# Altium schematic symbol library 调理电路板.SCHLIB: 432 symbols (part 4 of 8)
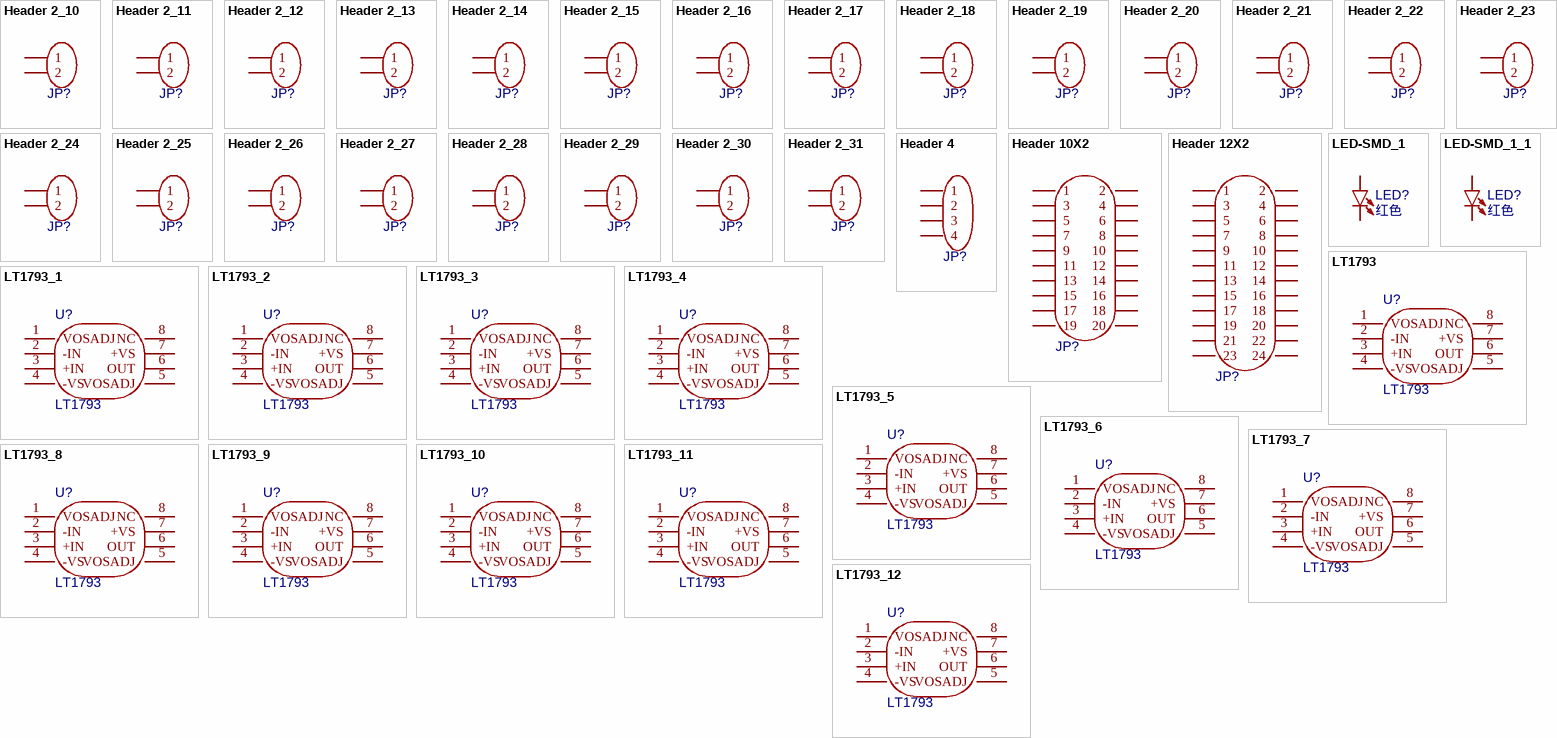
[diagram p13: symbols Header 2_10 to LT1793_12]

## Header 2_14
designator JP?, comment HDR-1X2  (value not drawn)
2P接插件; Device: Header 2; 版权归属: 封装库来自淘宝 ID：黄晶宝石; Origin Footprint: XH2.54-WI-2P; OriginFootprint 2: XH2.54-LI-2P; OriginFootprint 3: HDR2.54-M-LI-2P; OriginFootprint 4: HDR2.54-WI-2P; OriginFootprint 5: HDR2.54-WS-2P; OriginFootprint 6: HDR2.54-Y-LI-2P; OriginFootprint 7: HDR2.54-M-WS-2P; OriginFootprint 8: KF2510-LI-2P; OriginFootprint 9: XH2.54-WS-2P; OriginFootprint 10: XH2.54-LS-2P; OriginFootprint 11: KF2EDGK-2.54-LI-2P; OriginFootprint 12: KF2EDGK-2.54-WI-2P; UniqueId: 57b57ccbe062354d; AddInBom: yes; OriginModelName: HDR2.54-1P; BOM名称: 2P接插件; 联系售后: https://shop463601444.taobao.com; DesignItemID: Header 2; LibraryName: 5.4 - 接插件-脚距2.54 (100mil); SymbolName: Header 2; FootprintName: HDR2.54-LI-2P
footprint HDR2.54-LI-2P
pins: 1, 2

## Header 2_15
designator JP?, comment HDR-1X2  (value not drawn)
2P接插件; Device: Header 2; 版权归属: 封装库来自淘宝 ID：黄晶宝石; Origin Footprint: XH2.54-WI-2P; OriginFootprint 2: XH2.54-LI-2P; OriginFootprint 3: HDR2.54-M-LI-2P; OriginFootprint 4: HDR2.54-WI-2P; OriginFootprint 5: HDR2.54-WS-2P; OriginFootprint 6: HDR2.54-Y-LI-2P; OriginFootprint 7: HDR2.54-M-WS-2P; OriginFootprint 8: KF2510-LI-2P; OriginFootprint 9: XH2.54-WS-2P; OriginFootprint 10: XH2.54-LS-2P; OriginFootprint 11: KF2EDGK-2.54-LI-2P; OriginFootprint 12: KF2EDGK-2.54-WI-2P; UniqueId: 6655918135225170; AddInBom: yes; OriginModelName: HDR2.54-1P; BOM名称: 2P接插件; 联系售后: https://shop463601444.taobao.com; DesignItemID: Header 2; LibraryName: 5.4 - 接插件-脚距2.54 (100mil); SymbolName: Header 2; FootprintName: HDR2.54-LI-2P
footprint HDR2.54-LI-2P
pins: 1, 2

## Header 2_16
designator JP?, comment HDR-1X2  (value not drawn)
2P接插件; Device: Header 2; 版权归属: 封装库来自淘宝 ID：黄晶宝石; Origin Footprint: XH2.54-WI-2P; OriginFootprint 2: XH2.54-LI-2P; OriginFootprint 3: HDR2.54-M-LI-2P; OriginFootprint 4: HDR2.54-WI-2P; OriginFootprint 5: HDR2.54-WS-2P; OriginFootprint 6: HDR2.54-Y-LI-2P; OriginFootprint 7: HDR2.54-M-WS-2P; OriginFootprint 8: KF2510-LI-2P; OriginFootprint 9: XH2.54-WS-2P; OriginFootprint 10: XH2.54-LS-2P; OriginFootprint 11: KF2EDGK-2.54-LI-2P; OriginFootprint 12: KF2EDGK-2.54-WI-2P; UniqueId: 02277a1cd8d596a2; AddInBom: yes; OriginModelName: HDR2.54-1P; BOM名称: 2P接插件; 联系售后: https://shop463601444.taobao.com; DesignItemID: Header 2; LibraryName: 5.4 - 接插件-脚距2.54 (100mil); SymbolName: Header 2; FootprintName: HDR2.54-LI-2P
footprint HDR2.54-LI-2P
pins: 1, 2

## Header 2_17
designator JP?, comment HDR-1X2  (value not drawn)
2P接插件; Device: Header 2; 版权归属: 封装库来自淘宝 ID：黄晶宝石; Origin Footprint: XH2.54-WI-2P; OriginFootprint 2: XH2.54-LI-2P; OriginFootprint 3: HDR2.54-M-LI-2P; OriginFootprint 4: HDR2.54-WI-2P; OriginFootprint 5: HDR2.54-WS-2P; OriginFootprint 6: HDR2.54-Y-LI-2P; OriginFootprint 7: HDR2.54-M-WS-2P; OriginFootprint 8: KF2510-LI-2P; OriginFootprint 9: XH2.54-WS-2P; OriginFootprint 10: XH2.54-LS-2P; OriginFootprint 11: KF2EDGK-2.54-LI-2P; OriginFootprint 12: KF2EDGK-2.54-WI-2P; UniqueId: dacbd2010d520776; AddInBom: yes; OriginModelName: HDR2.54-1P; BOM名称: 2P接插件; 联系售后: https://shop463601444.taobao.com; DesignItemID: Header 2; LibraryName: 5.4 - 接插件-脚距2.54 (100mil); SymbolName: Header 2; FootprintName: HDR2.54-LI-2P
footprint HDR2.54-LI-2P
pins: 1, 2

## Header 2_18
designator JP?, comment HDR-1X2  (value not drawn)
2P接插件; Device: Header 2; 版权归属: 封装库来自淘宝 ID：黄晶宝石; Origin Footprint: XH2.54-WI-2P; OriginFootprint 2: XH2.54-LI-2P; OriginFootprint 3: HDR2.54-M-LI-2P; OriginFootprint 4: HDR2.54-WI-2P; OriginFootprint 5: HDR2.54-WS-2P; OriginFootprint 6: HDR2.54-Y-LI-2P; OriginFootprint 7: HDR2.54-M-WS-2P; OriginFootprint 8: KF2510-LI-2P; OriginFootprint 9: XH2.54-WS-2P; OriginFootprint 10: XH2.54-LS-2P; OriginFootprint 11: KF2EDGK-2.54-LI-2P; OriginFootprint 12: KF2EDGK-2.54-WI-2P; UniqueId: ddeec7be49001c93; AddInBom: yes; OriginModelName: HDR2.54-1P; BOM名称: 2P接插件; 联系售后: https://shop463601444.taobao.com; DesignItemID: Header 2; LibraryName: 5.4 - 接插件-脚距2.54 (100mil); SymbolName: Header 2; FootprintName: HDR2.54-LI-2P
footprint HDR2.54-LI-2P
pins: 1, 2

## Header 2_19
designator JP?, comment HDR-1X2  (value not drawn)
2P接插件; Device: Header 2; 版权归属: 封装库来自淘宝 ID：黄晶宝石; Origin Footprint: XH2.54-WI-2P; OriginFootprint 2: XH2.54-LI-2P; OriginFootprint 3: HDR2.54-M-LI-2P; OriginFootprint 4: HDR2.54-WI-2P; OriginFootprint 5: HDR2.54-WS-2P; OriginFootprint 6: HDR2.54-Y-LI-2P; OriginFootprint 7: HDR2.54-M-WS-2P; OriginFootprint 8: KF2510-LI-2P; OriginFootprint 9: XH2.54-WS-2P; OriginFootprint 10: XH2.54-LS-2P; OriginFootprint 11: KF2EDGK-2.54-LI-2P; OriginFootprint 12: KF2EDGK-2.54-WI-2P; UniqueId: 62dfc6d8d4781687; AddInBom: yes; OriginModelName: HDR2.54-1P; BOM名称: 2P接插件; 联系售后: https://shop463601444.taobao.com; DesignItemID: Header 2; LibraryName: 5.4 - 接插件-脚距2.54 (100mil); SymbolName: Header 2; FootprintName: HDR2.54-LI-2P
footprint HDR2.54-LI-2P
pins: 1, 2

## Header 2_20
designator JP?, comment HDR-1X2  (value not drawn)
2P接插件; Device: Header 2; 版权归属: 封装库来自淘宝 ID：黄晶宝石; Origin Footprint: XH2.54-WI-2P; OriginFootprint 2: XH2.54-LI-2P; OriginFootprint 3: HDR2.54-M-LI-2P; OriginFootprint 4: HDR2.54-WI-2P; OriginFootprint 5: HDR2.54-WS-2P; OriginFootprint 6: HDR2.54-Y-LI-2P; OriginFootprint 7: HDR2.54-M-WS-2P; OriginFootprint 8: KF2510-LI-2P; OriginFootprint 9: XH2.54-WS-2P; OriginFootprint 10: XH2.54-LS-2P; OriginFootprint 11: KF2EDGK-2.54-LI-2P; OriginFootprint 12: KF2EDGK-2.54-WI-2P; UniqueId: ac1a4a7fdd8dee85; AddInBom: yes; OriginModelName: HDR2.54-1P; BOM名称: 2P接插件; 联系售后: https://shop463601444.taobao.com; DesignItemID: Header 2; LibraryName: 5.4 - 接插件-脚距2.54 (100mil); SymbolName: Header 2; FootprintName: HDR2.54-LI-2P
footprint HDR2.54-LI-2P
pins: 1, 2

## Header 2_21
designator JP?, comment HDR-1X2  (value not drawn)
2P接插件; Device: Header 2; 版权归属: 封装库来自淘宝 ID：黄晶宝石; Origin Footprint: XH2.54-WI-2P; OriginFootprint 2: XH2.54-LI-2P; OriginFootprint 3: HDR2.54-M-LI-2P; OriginFootprint 4: HDR2.54-WI-2P; OriginFootprint 5: HDR2.54-WS-2P; OriginFootprint 6: HDR2.54-Y-LI-2P; OriginFootprint 7: HDR2.54-M-WS-2P; OriginFootprint 8: KF2510-LI-2P; OriginFootprint 9: XH2.54-WS-2P; OriginFootprint 10: XH2.54-LS-2P; OriginFootprint 11: KF2EDGK-2.54-LI-2P; OriginFootprint 12: KF2EDGK-2.54-WI-2P; UniqueId: c40e93d5b111b9de; AddInBom: yes; OriginModelName: HDR2.54-1P; BOM名称: 2P接插件; 联系售后: https://shop463601444.taobao.com; DesignItemID: Header 2; LibraryName: 5.4 - 接插件-脚距2.54 (100mil); SymbolName: Header 2; FootprintName: HDR2.54-LI-2P
footprint HDR2.54-LI-2P
pins: 1, 2

## Header 2_22
designator JP?, comment HDR-1X2  (value not drawn)
2P接插件; Device: Header 2; 版权归属: 封装库来自淘宝 ID：黄晶宝石; Origin Footprint: XH2.54-WI-2P; OriginFootprint 2: XH2.54-LI-2P; OriginFootprint 3: HDR2.54-M-LI-2P; OriginFootprint 4: HDR2.54-WI-2P; OriginFootprint 5: HDR2.54-WS-2P; OriginFootprint 6: HDR2.54-Y-LI-2P; OriginFootprint 7: HDR2.54-M-WS-2P; OriginFootprint 8: KF2510-LI-2P; OriginFootprint 9: XH2.54-WS-2P; OriginFootprint 10: XH2.54-LS-2P; OriginFootprint 11: KF2EDGK-2.54-LI-2P; OriginFootprint 12: KF2EDGK-2.54-WI-2P; UniqueId: 85e96206a86bca40; AddInBom: yes; OriginModelName: HDR2.54-1P; BOM名称: 2P接插件; 联系售后: https://shop463601444.taobao.com; DesignItemID: Header 2; LibraryName: 5.4 - 接插件-脚距2.54 (100mil); SymbolName: Header 2; FootprintName: HDR2.54-LI-2P
footprint HDR2.54-LI-2P
pins: 1, 2

## Header 2_23
designator JP?, comment HDR-1X2  (value not drawn)
2P接插件; Device: Header 2; 版权归属: 封装库来自淘宝 ID：黄晶宝石; Origin Footprint: XH2.54-WI-2P; OriginFootprint 2: XH2.54-LI-2P; OriginFootprint 3: HDR2.54-M-LI-2P; OriginFootprint 4: HDR2.54-WI-2P; OriginFootprint 5: HDR2.54-WS-2P; OriginFootprint 6: HDR2.54-Y-LI-2P; OriginFootprint 7: HDR2.54-M-WS-2P; OriginFootprint 8: KF2510-LI-2P; OriginFootprint 9: XH2.54-WS-2P; OriginFootprint 10: XH2.54-LS-2P; OriginFootprint 11: KF2EDGK-2.54-LI-2P; OriginFootprint 12: KF2EDGK-2.54-WI-2P; UniqueId: 307b99641c701ee0; AddInBom: yes; OriginModelName: HDR2.54-1P; BOM名称: 2P接插件; 联系售后: https://shop463601444.taobao.com; DesignItemID: Header 2; LibraryName: 5.4 - 接插件-脚距2.54 (100mil); SymbolName: Header 2; FootprintName: HDR2.54-LI-2P
footprint HDR2.54-LI-2P
pins: 1, 2

## Header 2_24
designator JP?, comment HDR-1X2  (value not drawn)
2P接插件; Device: Header 2; 版权归属: 封装库来自淘宝 ID：黄晶宝石; Origin Footprint: XH2.54-WI-2P; OriginFootprint 2: XH2.54-LI-2P; OriginFootprint 3: HDR2.54-M-LI-2P; OriginFootprint 4: HDR2.54-WI-2P; OriginFootprint 5: HDR2.54-WS-2P; OriginFootprint 6: HDR2.54-Y-LI-2P; OriginFootprint 7: HDR2.54-M-WS-2P; OriginFootprint 8: KF2510-LI-2P; OriginFootprint 9: XH2.54-WS-2P; OriginFootprint 10: XH2.54-LS-2P; OriginFootprint 11: KF2EDGK-2.54-LI-2P; OriginFootprint 12: KF2EDGK-2.54-WI-2P; UniqueId: 0f3af21d7fc89682; AddInBom: yes; OriginModelName: HDR2.54-1P; BOM名称: 2P接插件; 联系售后: https://shop463601444.taobao.com; DesignItemID: Header 2; LibraryName: 5.4 - 接插件-脚距2.54 (100mil); SymbolName: Header 2; FootprintName: HDR2.54-LI-2P
footprint HDR2.54-LI-2P
pins: 1, 2

## Header 2_25
designator JP?, comment HDR-1X2  (value not drawn)
2P接插件; Device: Header 2; 版权归属: 封装库来自淘宝 ID：黄晶宝石; Origin Footprint: XH2.54-WI-2P; OriginFootprint 2: XH2.54-LI-2P; OriginFootprint 3: HDR2.54-M-LI-2P; OriginFootprint 4: HDR2.54-WI-2P; OriginFootprint 5: HDR2.54-WS-2P; OriginFootprint 6: HDR2.54-Y-LI-2P; OriginFootprint 7: HDR2.54-M-WS-2P; OriginFootprint 8: KF2510-LI-2P; OriginFootprint 9: XH2.54-WS-2P; OriginFootprint 10: XH2.54-LS-2P; OriginFootprint 11: KF2EDGK-2.54-LI-2P; OriginFootprint 12: KF2EDGK-2.54-WI-2P; UniqueId: 61cd62acef56a4b1; AddInBom: yes; OriginModelName: HDR2.54-1P; BOM名称: 2P接插件; 联系售后: https://shop463601444.taobao.com; DesignItemID: Header 2; LibraryName: 5.4 - 接插件-脚距2.54 (100mil); SymbolName: Header 2; FootprintName: HDR2.54-LI-2P
footprint HDR2.54-LI-2P
pins: 1, 2

## Header 2_26
designator JP?, comment HDR-1X2  (value not drawn)
2P接插件; Device: Header 2; 版权归属: 封装库来自淘宝 ID：黄晶宝石; Origin Footprint: XH2.54-WI-2P; OriginFootprint 2: XH2.54-LI-2P; OriginFootprint 3: HDR2.54-M-LI-2P; OriginFootprint 4: HDR2.54-WI-2P; OriginFootprint 5: HDR2.54-WS-2P; OriginFootprint 6: HDR2.54-Y-LI-2P; OriginFootprint 7: HDR2.54-M-WS-2P; OriginFootprint 8: KF2510-LI-2P; OriginFootprint 9: XH2.54-WS-2P; OriginFootprint 10: XH2.54-LS-2P; OriginFootprint 11: KF2EDGK-2.54-LI-2P; OriginFootprint 12: KF2EDGK-2.54-WI-2P; UniqueId: 6d8656e8ed237838; AddInBom: yes; OriginModelName: HDR2.54-1P; BOM名称: 2P接插件; 联系售后: https://shop463601444.taobao.com; DesignItemID: Header 2; LibraryName: 5.4 - 接插件-脚距2.54 (100mil); SymbolName: Header 2; FootprintName: HDR2.54-LI-2P
footprint HDR2.54-LI-2P
pins: 1, 2

## Header 2_27
designator JP?, comment HDR-1X2  (value not drawn)
2P接插件; Device: Header 2; 版权归属: 封装库来自淘宝 ID：黄晶宝石; Origin Footprint: XH2.54-WI-2P; OriginFootprint 2: XH2.54-LI-2P; OriginFootprint 3: HDR2.54-M-LI-2P; OriginFootprint 4: HDR2.54-WI-2P; OriginFootprint 5: HDR2.54-WS-2P; OriginFootprint 6: HDR2.54-Y-LI-2P; OriginFootprint 7: HDR2.54-M-WS-2P; OriginFootprint 8: KF2510-LI-2P; OriginFootprint 9: XH2.54-WS-2P; OriginFootprint 10: XH2.54-LS-2P; OriginFootprint 11: KF2EDGK-2.54-LI-2P; OriginFootprint 12: KF2EDGK-2.54-WI-2P; UniqueId: 7db8ea879d3067b5; AddInBom: yes; OriginModelName: HDR2.54-1P; BOM名称: 2P接插件; 联系售后: https://shop463601444.taobao.com; DesignItemID: Header 2; LibraryName: 5.4 - 接插件-脚距2.54 (100mil); SymbolName: Header 2; FootprintName: HDR2.54-LI-2P
footprint HDR2.54-LI-2P
pins: 1, 2

## Header 2_28
designator JP?, comment HDR-1X2  (value not drawn)
2P接插件; Device: Header 2; 版权归属: 封装库来自淘宝 ID：黄晶宝石; Origin Footprint: XH2.54-WI-2P; OriginFootprint 2: XH2.54-LI-2P; OriginFootprint 3: HDR2.54-M-LI-2P; OriginFootprint 4: HDR2.54-WI-2P; OriginFootprint 5: HDR2.54-WS-2P; OriginFootprint 6: HDR2.54-Y-LI-2P; OriginFootprint 7: HDR2.54-M-WS-2P; OriginFootprint 8: KF2510-LI-2P; OriginFootprint 9: XH2.54-WS-2P; OriginFootprint 10: XH2.54-LS-2P; OriginFootprint 11: KF2EDGK-2.54-LI-2P; OriginFootprint 12: KF2EDGK-2.54-WI-2P; UniqueId: 935b54861c2e40de; AddInBom: yes; OriginModelName: HDR2.54-1P; BOM名称: 2P接插件; 联系售后: https://shop463601444.taobao.com; DesignItemID: Header 2; LibraryName: 5.4 - 接插件-脚距2.54 (100mil); SymbolName: Header 2; FootprintName: HDR2.54-LI-2P
footprint HDR2.54-LI-2P
pins: 1, 2

## Header 2_29
designator JP?, comment HDR-1X2  (value not drawn)
2P接插件; Device: Header 2; 版权归属: 封装库来自淘宝 ID：黄晶宝石; Origin Footprint: XH2.54-WI-2P; OriginFootprint 2: XH2.54-LI-2P; OriginFootprint 3: HDR2.54-M-LI-2P; OriginFootprint 4: HDR2.54-WI-2P; OriginFootprint 5: HDR2.54-WS-2P; OriginFootprint 6: HDR2.54-Y-LI-2P; OriginFootprint 7: HDR2.54-M-WS-2P; OriginFootprint 8: KF2510-LI-2P; OriginFootprint 9: XH2.54-WS-2P; OriginFootprint 10: XH2.54-LS-2P; OriginFootprint 11: KF2EDGK-2.54-LI-2P; OriginFootprint 12: KF2EDGK-2.54-WI-2P; UniqueId: 228f0eb2e9fc8410; AddInBom: yes; OriginModelName: HDR2.54-1P; BOM名称: 2P接插件; 联系售后: https://shop463601444.taobao.com; DesignItemID: Header 2; LibraryName: 5.4 - 接插件-脚距2.54 (100mil); SymbolName: Header 2; FootprintName: HDR2.54-LI-2P
footprint HDR2.54-LI-2P
pins: 1, 2

## Header 2_30
designator JP?, comment HDR-1X2  (value not drawn)
2P接插件; Device: Header 2; 版权归属: 封装库来自淘宝 ID：黄晶宝石; Origin Footprint: XH2.54-WI-2P; OriginFootprint 2: XH2.54-LI-2P; OriginFootprint 3: HDR2.54-M-LI-2P; OriginFootprint 4: HDR2.54-WI-2P; OriginFootprint 5: HDR2.54-WS-2P; OriginFootprint 6: HDR2.54-Y-LI-2P; OriginFootprint 7: HDR2.54-M-WS-2P; OriginFootprint 8: KF2510-LI-2P; OriginFootprint 9: XH2.54-WS-2P; OriginFootprint 10: XH2.54-LS-2P; OriginFootprint 11: KF2EDGK-2.54-LI-2P; OriginFootprint 12: KF2EDGK-2.54-WI-2P; UniqueId: fcba59359dd8e679; AddInBom: yes; OriginModelName: HDR2.54-1P; BOM名称: 2P接插件; 联系售后: https://shop463601444.taobao.com; DesignItemID: Header 2; LibraryName: 5.4 - 接插件-脚距2.54 (100mil); SymbolName: Header 2; FootprintName: HDR2.54-LI-2P
footprint HDR2.54-LI-2P
pins: 1, 2

## Header 2_31
designator JP?, comment HDR-1X2  (value not drawn)
2P接插件; Device: Header 2; 版权归属: 封装库来自淘宝 ID：黄晶宝石; Origin Footprint: XH2.54-WI-2P; OriginFootprint 2: XH2.54-LI-2P; OriginFootprint 3: HDR2.54-M-LI-2P; OriginFootprint 4: HDR2.54-WI-2P; OriginFootprint 5: HDR2.54-WS-2P; OriginFootprint 6: HDR2.54-Y-LI-2P; OriginFootprint 7: HDR2.54-M-WS-2P; OriginFootprint 8: KF2510-LI-2P; OriginFootprint 9: XH2.54-WS-2P; OriginFootprint 10: XH2.54-LS-2P; OriginFootprint 11: KF2EDGK-2.54-LI-2P; OriginFootprint 12: KF2EDGK-2.54-WI-2P; UniqueId: fa82831371ccd6d5; AddInBom: yes; OriginModelName: HDR2.54-1P; BOM名称: 2P接插件; 联系售后: https://shop463601444.taobao.com; DesignItemID: Header 2; LibraryName: 5.4 - 接插件-脚距2.54 (100mil); SymbolName: Header 2; FootprintName: HDR2.54-LI-2P
footprint HDR2.54-LI-2P
pins: 1, 2

## Header 4
designator JP?, comment HDR-1X4  (value not drawn)
4P接插件; Device: Header 4; 版权归属: 封装库来自淘宝 ID：黄晶宝石; Origin Footprint: XH2.54-WI-4P; OriginFootprint 2: XH2.54-LI-4P; OriginFootprint 3: HDR2.54-M-LI-4P; OriginFootprint 4: HDR2.54-WI-4P; OriginFootprint 5: HDR2.54-WS-4P; OriginFootprint 6: HDR2.54-Y-LI-4P; OriginFootprint 7: HDR2.54-M-WS-4P; OriginFootprint 8: KF2510-LI-4P; OriginFootprint 9: XH2.54-WS-4P; OriginFootprint 10: XH2.54-LS-4P; OriginFootprint 11: KF2EDGK-2.54-LI-4P; OriginFootprint 12: KF2EDGK-2.54-WI-4P; UniqueId: 7d0fef31601b2a16; AddInBom: yes; OriginModelName: HDR2.54-1P; BOM名称: 4P接插件; 学习资源: https://shop463601444.taobao.com; DesignItemID: Header 4; LibraryName: 5.4 - 接插件-脚距2.54 (100mil); SymbolName: Header 4; FootprintName: HDR2.54-LI-4P
footprint HDR2.54-LI-4P
pins: 1, 2, 3, 4

## Header 10X2
designator JP?, comment Header 2X10  (value not drawn)
10*2P接插件; Device: Header 10X2; 版权归属: 源创客; Origin Footprint: HDR2.54-LI-2x10P; OriginFootprint 2: HDR2.54-M-LS-2x10P; OriginFootprint 3: HDR2.54-WI-2x10P; UniqueId: 6cc01166e21fefcf; AddInBom: yes; OriginModelName: IDC2.54-20P; BOM名称: 10*2P接插件; 学习资源: www.ooocke.com; DesignItemID: Header 10X2; LibraryName: 5.4 - 接插件-脚距2.54 (100mil); SymbolName: Header 10X2; FootprintName: IDC2.54-LI-2x10P
footprint IDC2.54-LI-2x10P
pins: 1, 2, 3, 4, 5, 6, 7, 8, 9, 10, 11, 12, 13, 14, 15, 16, 17, 18, 19, 20

## Header 12X2
designator JP?, comment Header 2X11  (value not drawn)
12*2P接插件; Device: Header 12X2; 版权归属: 封装库来自淘宝卖家 ID：黄晶宝石; Origin Footprint: HDR2.54-LI-2x12P; OriginFootprint 2: HDR2.54-M-LS-2x12P; OriginFootprint 3: HDR2.54-WI-2x12P; UniqueId: 1c4eb4c39cf6ab8e; AddInBom: yes; OriginModelName: IDC2.54-24P; BOM名称: 12*2P接插件; 学习资源: https://shop463601444.taobao.com; DesignItemID: Header 12X2; LibraryName: 5.4 - 接插件-脚距2.54 (100mil); SymbolName: Header 12X2; FootprintName: IDC2.54-LI-2x12P
footprint IDC2.54-LI-2x12P
pins: 1, 2, 3, 4, 5, 6, 7, 8, 9, 10, 11, 12, 13, 14, 15, 16, 17, 18, 19, 20, 21, 22, 23, 24

## LED-SMD_1
designator LED?, comment 红色
贴片LED; Device: LED-SMD_1; 版权归属: 封装库来自淘宝 ID：黄晶宝石; Origin Footprint: LED 0603W; OriginFootprint 2: LED 0603B; OriginFootprint 3: LED 0603G; OriginFootprint 4: LED 0603Y; OriginFootprint 5: LED 0805G; OriginFootprint 6: LED 0805R; OriginFootprint 7: LED 0805B; OriginFootprint 8: LED 0805Y; OriginFootprint 9: LED 3528-2Pin; OriginFootprint 10: LED 1206G; OriginFootprint 11: LED 5730-V; OriginFootprint 12: LED 1206Y; OriginFootprint 13: LED 0805W; OriginFootprint 14: LED 1206B; OriginFootprint 15: LED 1206W; OriginFootprint 16: LED 1206R; Symbol: LED-SMD; AddInBom: yes; OriginModelName: LED 0603-R; BOM名称: 贴片LED; 学习资源: https://shop463601444.taobao.com; DesignItemID: LED-SMD; LibraryName: 0.3 - LED发光二极管; FootprintName: LED 0603R
footprint LED 0603R
pins: 1 A, 2 K

## LED-SMD_1_1
designator LED?, comment 红色
贴片LED; Symbol: LED-SMD; Device: LED-SMD_1; 版权归属: 封装库来自淘宝 ID：黄晶宝石; Origin Footprint: LED 0603W; OriginFootprint 2: LED 0603B; OriginFootprint 3: LED 0603G; OriginFootprint 4: LED 0603Y; OriginFootprint 5: LED 0805G; OriginFootprint 6: LED 0805R; OriginFootprint 7: LED 0805B; OriginFootprint 8: LED 0805Y; OriginFootprint 9: LED 3528-2Pin; OriginFootprint 10: LED 1206G; OriginFootprint 11: LED 5730-V; OriginFootprint 12: LED 1206Y; OriginFootprint 13: LED 0805W; OriginFootprint 14: LED 1206B; OriginFootprint 15: LED 1206W; OriginFootprint 16: LED 1206R; Origin 3D Model Title: LED 0603-R; AddInBom: yes; BOM名称: 贴片LED; 学习资源: https://shop463601444.taobao.com; DesignItemID: LED-SMD; LibraryName: 0.3 - LED发光二极管; FootprintName: LED 0603R
footprint LED 0603R
pins: 1 A, 2 K

## LT1793
designator U?
LT1793CS8#PBF; UniqueId: 48f0ae2437312dae; AddInBom: yes; OriginModelName: User Library-so-8; Device: LT1793; DesignItemID: LT1793; LibraryName: 1.6 - ADI系列精密运放; SymbolName: LT1793; FootprintName: SOP-8
footprint SOP-8
pins: 1 VOSADJ, 2 -IN, 3 +IN, 4 -VS, 5 VOSADJ, 6 OUT, 7 +VS, 8 NC

## LT1793_1
designator U?, comment LT1793
LT1793CS8#PBF; UniqueId: 124c013cfc851acc; AddInBom: yes; OriginModelName: User Library-so-8; Device: LT1793; DesignItemID: LT1793; LibraryName: 1.6 - ADI系列精密运放; SymbolName: LT1793; FootprintName: SOP-8
footprint SOP-8
pins: 1 VOSADJ, 2 -IN, 3 +IN, 4 -VS, 5 VOSADJ, 6 OUT, 7 +VS, 8 NC

## LT1793_2
designator U?, comment LT1793
LT1793CS8#PBF; UniqueId: 66797bcd97f4f6c2; AddInBom: yes; OriginModelName: User Library-so-8; Device: LT1793; DesignItemID: LT1793; LibraryName: 1.6 - ADI系列精密运放; SymbolName: LT1793; FootprintName: SOP-8
footprint SOP-8
pins: 1 VOSADJ, 2 -IN, 3 +IN, 4 -VS, 5 VOSADJ, 6 OUT, 7 +VS, 8 NC

## LT1793_3
designator U?, comment LT1793
LT1793CS8#PBF; UniqueId: 4ec783ed4741de1f; AddInBom: yes; OriginModelName: User Library-so-8; Device: LT1793; DesignItemID: LT1793; LibraryName: 1.6 - ADI系列精密运放; SymbolName: LT1793; FootprintName: SOP-8
footprint SOP-8
pins: 1 VOSADJ, 2 -IN, 3 +IN, 4 -VS, 5 VOSADJ, 6 OUT, 7 +VS, 8 NC

## LT1793_4
designator U?, comment LT1793
LT1793CS8#PBF; UniqueId: bac468049775df37; AddInBom: yes; OriginModelName: User Library-so-8; Device: LT1793; DesignItemID: LT1793; LibraryName: 1.6 - ADI系列精密运放; SymbolName: LT1793; FootprintName: SOP-8
footprint SOP-8
pins: 1 VOSADJ, 2 -IN, 3 +IN, 4 -VS, 5 VOSADJ, 6 OUT, 7 +VS, 8 NC

## LT1793_5
designator U?, comment LT1793
LT1793CS8#PBF; UniqueId: 484e3008dca2bfa8; AddInBom: yes; OriginModelName: User Library-so-8; Device: LT1793; DesignItemID: LT1793; LibraryName: 1.6 - ADI系列精密运放; SymbolName: LT1793; FootprintName: SOP-8
footprint SOP-8
pins: 1 VOSADJ, 2 -IN, 3 +IN, 4 -VS, 5 VOSADJ, 6 OUT, 7 +VS, 8 NC

## LT1793_6
designator U?, comment LT1793
LT1793CS8#PBF; UniqueId: adf583383e4d69d4; AddInBom: yes; OriginModelName: User Library-so-8; Device: LT1793; DesignItemID: LT1793; LibraryName: 1.6 - ADI系列精密运放; SymbolName: LT1793; FootprintName: SOP-8
footprint SOP-8
pins: 1 VOSADJ, 2 -IN, 3 +IN, 4 -VS, 5 VOSADJ, 6 OUT, 7 +VS, 8 NC

## LT1793_7
designator U?, comment LT1793
LT1793CS8#PBF; UniqueId: 2dbbb3175ebf36d7; AddInBom: yes; OriginModelName: User Library-so-8; Device: LT1793; DesignItemID: LT1793; LibraryName: 1.6 - ADI系列精密运放; SymbolName: LT1793; FootprintName: SOP-8
footprint SOP-8
pins: 1 VOSADJ, 2 -IN, 3 +IN, 4 -VS, 5 VOSADJ, 6 OUT, 7 +VS, 8 NC

## LT1793_8
designator U?, comment LT1793
LT1793CS8#PBF; UniqueId: 1a5dee1823ef113a; AddInBom: yes; OriginModelName: User Library-so-8; Device: LT1793; DesignItemID: LT1793; LibraryName: 1.6 - ADI系列精密运放; SymbolName: LT1793; FootprintName: SOP-8
footprint SOP-8
pins: 1 VOSADJ, 2 -IN, 3 +IN, 4 -VS, 5 VOSADJ, 6 OUT, 7 +VS, 8 NC

## LT1793_9
designator U?, comment LT1793
LT1793CS8#PBF; UniqueId: 2c27b242a2875aaf; AddInBom: yes; OriginModelName: User Library-so-8; Device: LT1793; DesignItemID: LT1793; LibraryName: 1.6 - ADI系列精密运放; SymbolName: LT1793; FootprintName: SOP-8
footprint SOP-8
pins: 1 VOSADJ, 2 -IN, 3 +IN, 4 -VS, 5 VOSADJ, 6 OUT, 7 +VS, 8 NC

## LT1793_10
designator U?, comment LT1793
LT1793CS8#PBF; UniqueId: 3b01714176430545; AddInBom: yes; OriginModelName: User Library-so-8; Device: LT1793; DesignItemID: LT1793; LibraryName: 1.6 - ADI系列精密运放; SymbolName: LT1793; FootprintName: SOP-8
footprint SOP-8
pins: 1 VOSADJ, 2 -IN, 3 +IN, 4 -VS, 5 VOSADJ, 6 OUT, 7 +VS, 8 NC

## LT1793_11
designator U?, comment LT1793
LT1793CS8#PBF; UniqueId: b94fd32bcc95872d; AddInBom: yes; OriginModelName: User Library-so-8; Device: LT1793; DesignItemID: LT1793; LibraryName: 1.6 - ADI系列精密运放; SymbolName: LT1793; FootprintName: SOP-8
footprint SOP-8
pins: 1 VOSADJ, 2 -IN, 3 +IN, 4 -VS, 5 VOSADJ, 6 OUT, 7 +VS, 8 NC

## LT1793_12
designator U?, comment LT1793
LT1793CS8#PBF; UniqueId: a4a6b0395ae03088; AddInBom: yes; OriginModelName: User Library-so-8; Device: LT1793; DesignItemID: LT1793; LibraryName: 1.6 - ADI系列精密运放; SymbolName: LT1793; FootprintName: SOP-8
footprint SOP-8
pins: 1 VOSADJ, 2 -IN, 3 +IN, 4 -VS, 5 VOSADJ, 6 OUT, 7 +VS, 8 NC

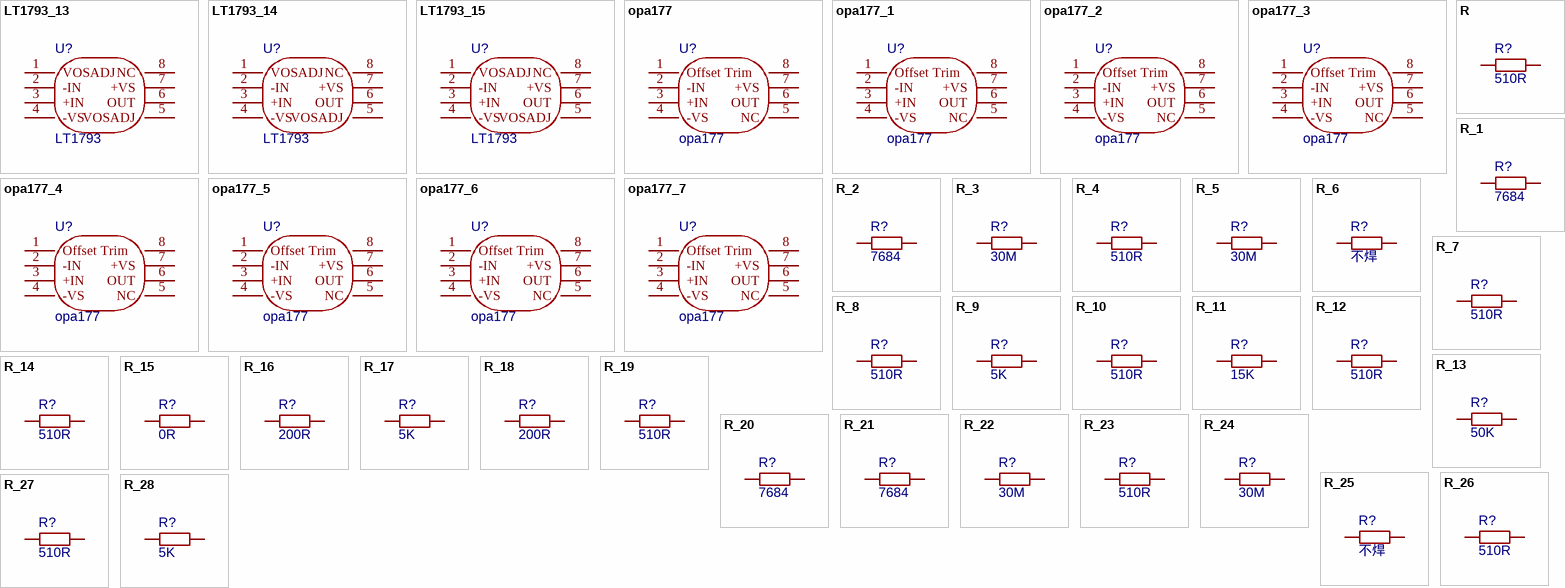
[diagram p5: symbols LT1793_13 to R_28]

## LT1793_13
designator U?, comment LT1793
LT1793CS8#PBF; UniqueId: be87043ebfc5f98d; AddInBom: yes; OriginModelName: User Library-so-8; Device: LT1793; DesignItemID: LT1793; LibraryName: 1.6 - ADI系列精密运放; SymbolName: LT1793; FootprintName: SOP-8
footprint SOP-8
pins: 1 VOSADJ, 2 -IN, 3 +IN, 4 -VS, 5 VOSADJ, 6 OUT, 7 +VS, 8 NC

## LT1793_14
designator U?, comment LT1793
LT1793CS8#PBF; UniqueId: bbc2f931070973b7; AddInBom: yes; OriginModelName: User Library-so-8; Device: LT1793; DesignItemID: LT1793; LibraryName: 1.6 - ADI系列精密运放; SymbolName: LT1793; FootprintName: SOP-8
footprint SOP-8
pins: 1 VOSADJ, 2 -IN, 3 +IN, 4 -VS, 5 VOSADJ, 6 OUT, 7 +VS, 8 NC

## LT1793_15
designator U?, comment LT1793
LT1793CS8#PBF; UniqueId: 03a1f9b1f2129ca8; AddInBom: yes; OriginModelName: User Library-so-8; Device: LT1793; DesignItemID: LT1793; LibraryName: 1.6 - ADI系列精密运放; SymbolName: LT1793; FootprintName: SOP-8
footprint SOP-8
pins: 1 VOSADJ, 2 -IN, 3 +IN, 4 -VS, 5 VOSADJ, 6 OUT, 7 +VS, 8 NC

## opa177
designator U?
opa177gs; UniqueId: 2fd166bdb6936536; AddInBom: yes; Device: opa177; DesignItemID: opa177; LibraryName: 1.6 - ADI系列精密运放; SymbolName: opa177; FootprintName: SOP-8
footprint SOP-8
pins: 1 Offset Trim, 2 -IN, 3 +IN, 4 -VS, 5 NC, 6 OUT, 7 +VS, 8

## opa177_1
designator U?, comment opa177
opa177gs; UniqueId: b6112465b0588c80; AddInBom: yes; Device: opa177; DesignItemID: opa177; LibraryName: 1.6 - ADI系列精密运放; SymbolName: opa177; FootprintName: SOP-8
footprint SOP-8
pins: 1 Offset Trim, 2 -IN, 3 +IN, 4 -VS, 5 NC, 6 OUT, 7 +VS, 8

## opa177_2
designator U?, comment opa177
opa177gs; UniqueId: 95e557ff5ab9d76b; AddInBom: yes; Device: opa177; DesignItemID: opa177; LibraryName: 1.6 - ADI系列精密运放; SymbolName: opa177; FootprintName: SOP-8
footprint SOP-8
pins: 1 Offset Trim, 2 -IN, 3 +IN, 4 -VS, 5 NC, 6 OUT, 7 +VS, 8

## opa177_3
designator U?, comment opa177
opa177gs; UniqueId: 8791d75d94e1481b; AddInBom: yes; Device: opa177; DesignItemID: opa177; LibraryName: 1.6 - ADI系列精密运放; SymbolName: opa177; FootprintName: SOP-8
footprint SOP-8
pins: 1 Offset Trim, 2 -IN, 3 +IN, 4 -VS, 5 NC, 6 OUT, 7 +VS, 8

## opa177_4
designator U?, comment opa177
opa177gs; UniqueId: 5cc2e1a47a47cde8; AddInBom: yes; Device: opa177; DesignItemID: opa177; LibraryName: 1.6 - ADI系列精密运放; SymbolName: opa177; FootprintName: SOP-8
footprint SOP-8
pins: 1 Offset Trim, 2 -IN, 3 +IN, 4 -VS, 5 NC, 6 OUT, 7 +VS, 8

## opa177_5
designator U?, comment opa177
opa177gs; UniqueId: cef81dc8ca229e23; AddInBom: yes; Device: opa177; DesignItemID: opa177; LibraryName: 1.6 - ADI系列精密运放; SymbolName: opa177; FootprintName: SOP-8
footprint SOP-8
pins: 1 Offset Trim, 2 -IN, 3 +IN, 4 -VS, 5 NC, 6 OUT, 7 +VS, 8

## opa177_6
designator U?, comment opa177
opa177gs; UniqueId: 7897a21cee29467e; AddInBom: yes; Device: opa177; DesignItemID: opa177; LibraryName: 1.6 - ADI系列精密运放; SymbolName: opa177; FootprintName: SOP-8
footprint SOP-8
pins: 1 Offset Trim, 2 -IN, 3 +IN, 4 -VS, 5 NC, 6 OUT, 7 +VS, 8

## opa177_7
designator U?, comment opa177
opa177gs; UniqueId: cdc65714531fc236; AddInBom: yes; Device: opa177; DesignItemID: opa177; LibraryName: 1.6 - ADI系列精密运放; SymbolName: opa177; FootprintName: SOP-8
footprint SOP-8
pins: 1 Offset Trim, 2 -IN, 3 +IN, 4 -VS, 5 NC, 6 OUT, 7 +VS, 8

## R
designator R?, comment 510R
贴片电阻; Device: R; 版权归属: 来自淘宝 ID：黄晶宝石; 封装库来自淘宝卖家 ID：黄晶宝石: 其他店铺购入均为盗版，不享受售后技术支持服务，请立即申请退款; Origin Footprint: R 0201_L; OriginFootprint 2: R 0402_L; OriginFootprint 3: R 0805_L; OriginFootprint 4: R 1206_L; OriginFootprint 5: R 1210_L; OriginFootprint 6: R 1812_L; OriginFootprint 7: R 2010_L; OriginFootprint 8: R 2512_L; OriginFootprint 9: R 0201_M; OriginFootprint 10: R 0402_M; OriginFootprint 11: R 0603_M; OriginFootprint 12: R 0805_M; OriginFootprint 13: R 1206_M; OriginFootprint 14: R 1210_M; OriginFootprint 15: R 1812_M; OriginFootprint 16: R 2010_M; OriginFootprint 17: R 2512_M; UniqueId: fe89d0632cfce75f; AddInBom: yes; OriginModelName: R 0603; BOM名称: 贴片电阻; 联系售后: https://shop463601444.taobao.com; DesignItemID: R; LibraryName: 0.1 - 电阻-电容-电感; SymbolName: R; FootprintName: R 0603_L
footprint R 0603_L
pins: 1, 2

## R_1
designator R?, comment 7684
贴片电阻; Device: R; 版权归属: 来自淘宝 ID：黄晶宝石; 封装库来自淘宝卖家 ID：黄晶宝石: 其他店铺购入均为盗版，不享受售后技术支持服务，请立即申请退款; Origin Footprint: R 0201_L; OriginFootprint 2: R 0402_L; OriginFootprint 3: R 0805_L; OriginFootprint 4: R 1206_L; OriginFootprint 5: R 1210_L; OriginFootprint 6: R 1812_L; OriginFootprint 7: R 2010_L; OriginFootprint 8: R 2512_L; OriginFootprint 9: R 0201_M; OriginFootprint 10: R 0402_M; OriginFootprint 11: R 0603_M; OriginFootprint 12: R 0805_M; OriginFootprint 13: R 1206_M; OriginFootprint 14: R 1210_M; OriginFootprint 15: R 1812_M; OriginFootprint 16: R 2010_M; OriginFootprint 17: R 2512_M; UniqueId: ff4077a9ca69db92; AddInBom: yes; OriginModelName: R 0603; BOM名称: 贴片电阻; 联系售后: https://shop463601444.taobao.com; DesignItemID: R; LibraryName: 0.1 - 电阻-电容-电感; SymbolName: R; FootprintName: R 0603_L
footprint R 0603_L
pins: 1, 2

## R_2
designator R?, comment 7684
贴片电阻; Device: R; 版权归属: 来自淘宝 ID：黄晶宝石; 封装库来自淘宝卖家 ID：黄晶宝石: 其他店铺购入均为盗版，不享受售后技术支持服务，请立即申请退款; Origin Footprint: R 0201_L; OriginFootprint 2: R 0402_L; OriginFootprint 3: R 0805_L; OriginFootprint 4: R 1206_L; OriginFootprint 5: R 1210_L; OriginFootprint 6: R 1812_L; OriginFootprint 7: R 2010_L; OriginFootprint 8: R 2512_L; OriginFootprint 9: R 0201_M; OriginFootprint 10: R 0402_M; OriginFootprint 11: R 0603_M; OriginFootprint 12: R 0805_M; OriginFootprint 13: R 1206_M; OriginFootprint 14: R 1210_M; OriginFootprint 15: R 1812_M; OriginFootprint 16: R 2010_M; OriginFootprint 17: R 2512_M; UniqueId: ba2c6d155e7fd301; AddInBom: yes; OriginModelName: R 0603; BOM名称: 贴片电阻; 联系售后: https://shop463601444.taobao.com; DesignItemID: R; LibraryName: 0.1 - 电阻-电容-电感; SymbolName: R; FootprintName: R 0603_L
footprint R 0603_L
pins: 1, 2

## R_3
designator R?, comment 30M
贴片电阻; Device: R; 版权归属: 来自淘宝 ID：黄晶宝石; 封装库来自淘宝卖家 ID：黄晶宝石: 其他店铺购入均为盗版，不享受售后技术支持服务，请立即申请退款; Origin Footprint: R 0201_L; OriginFootprint 2: R 0402_L; OriginFootprint 3: R 0805_L; OriginFootprint 4: R 1206_L; OriginFootprint 5: R 1210_L; OriginFootprint 6: R 1812_L; OriginFootprint 7: R 2010_L; OriginFootprint 8: R 2512_L; OriginFootprint 9: R 0201_M; OriginFootprint 10: R 0402_M; OriginFootprint 11: R 0603_M; OriginFootprint 12: R 0805_M; OriginFootprint 13: R 1206_M; OriginFootprint 14: R 1210_M; OriginFootprint 15: R 1812_M; OriginFootprint 16: R 2010_M; OriginFootprint 17: R 2512_M; UniqueId: fa394caafc8878d8; AddInBom: yes; OriginModelName: R 0603; BOM名称: 贴片电阻; 联系售后: https://shop463601444.taobao.com; DesignItemID: R; LibraryName: 0.1 - 电阻-电容-电感; SymbolName: R; FootprintName: R 0603_L
footprint R 0603_L
pins: 1, 2

## R_4
designator R?, comment 510R
贴片电阻; Device: R; 版权归属: 来自淘宝 ID：黄晶宝石; 封装库来自淘宝卖家 ID：黄晶宝石: 其他店铺购入均为盗版，不享受售后技术支持服务，请立即申请退款; Origin Footprint: R 0201_L; OriginFootprint 2: R 0402_L; OriginFootprint 3: R 0805_L; OriginFootprint 4: R 1206_L; OriginFootprint 5: R 1210_L; OriginFootprint 6: R 1812_L; OriginFootprint 7: R 2010_L; OriginFootprint 8: R 2512_L; OriginFootprint 9: R 0201_M; OriginFootprint 10: R 0402_M; OriginFootprint 11: R 0603_M; OriginFootprint 12: R 0805_M; OriginFootprint 13: R 1206_M; OriginFootprint 14: R 1210_M; OriginFootprint 15: R 1812_M; OriginFootprint 16: R 2010_M; OriginFootprint 17: R 2512_M; UniqueId: 9e71ce6b7342da3b; AddInBom: yes; OriginModelName: R 0603; BOM名称: 贴片电阻; 联系售后: https://shop463601444.taobao.com; DesignItemID: R; LibraryName: 0.1 - 电阻-电容-电感; SymbolName: R; FootprintName: R 0603_L
footprint R 0603_L
pins: 1, 2

## R_5
designator R?, comment 30M
贴片电阻; Device: R; 版权归属: 来自淘宝 ID：黄晶宝石; 封装库来自淘宝卖家 ID：黄晶宝石: 其他店铺购入均为盗版，不享受售后技术支持服务，请立即申请退款; Origin Footprint: R 0201_L; OriginFootprint 2: R 0402_L; OriginFootprint 3: R 0805_L; OriginFootprint 4: R 1206_L; OriginFootprint 5: R 1210_L; OriginFootprint 6: R 1812_L; OriginFootprint 7: R 2010_L; OriginFootprint 8: R 2512_L; OriginFootprint 9: R 0201_M; OriginFootprint 10: R 0402_M; OriginFootprint 11: R 0603_M; OriginFootprint 12: R 0805_M; OriginFootprint 13: R 1206_M; OriginFootprint 14: R 1210_M; OriginFootprint 15: R 1812_M; OriginFootprint 16: R 2010_M; OriginFootprint 17: R 2512_M; UniqueId: 61aee2c7162d13e5; AddInBom: yes; OriginModelName: R 0603; BOM名称: 贴片电阻; 联系售后: https://shop463601444.taobao.com; DesignItemID: R; LibraryName: 0.1 - 电阻-电容-电感; SymbolName: R; FootprintName: R 0603_L
footprint R 0603_L
pins: 1, 2

## R_6
designator R?, comment 不焊
贴片电阻; Device: R; 版权归属: 来自淘宝 ID：黄晶宝石; 封装库来自淘宝卖家 ID：黄晶宝石: 其他店铺购入均为盗版，不享受售后技术支持服务，请立即申请退款; Origin Footprint: R 0201_L; OriginFootprint 2: R 0402_L; OriginFootprint 3: R 0805_L; OriginFootprint 4: R 1206_L; OriginFootprint 5: R 1210_L; OriginFootprint 6: R 1812_L; OriginFootprint 7: R 2010_L; OriginFootprint 8: R 2512_L; OriginFootprint 9: R 0201_M; OriginFootprint 10: R 0402_M; OriginFootprint 11: R 0603_M; OriginFootprint 12: R 0805_M; OriginFootprint 13: R 1206_M; OriginFootprint 14: R 1210_M; OriginFootprint 15: R 1812_M; OriginFootprint 16: R 2010_M; OriginFootprint 17: R 2512_M; UniqueId: d9f908b8ca857374; AddInBom: yes; OriginModelName: R 0603; BOM名称: 贴片电阻; 联系售后: https://shop463601444.taobao.com; DesignItemID: R; LibraryName: 0.1 - 电阻-电容-电感; SymbolName: R; FootprintName: R 0603_L
footprint R 0603_L
pins: 1, 2

## R_7
designator R?, comment 510R
贴片电阻; Device: R; 版权归属: 来自淘宝 ID：黄晶宝石; 封装库来自淘宝卖家 ID：黄晶宝石: 其他店铺购入均为盗版，不享受售后技术支持服务，请立即申请退款; Origin Footprint: R 0201_L; OriginFootprint 2: R 0402_L; OriginFootprint 3: R 0805_L; OriginFootprint 4: R 1206_L; OriginFootprint 5: R 1210_L; OriginFootprint 6: R 1812_L; OriginFootprint 7: R 2010_L; OriginFootprint 8: R 2512_L; OriginFootprint 9: R 0201_M; OriginFootprint 10: R 0402_M; OriginFootprint 11: R 0603_M; OriginFootprint 12: R 0805_M; OriginFootprint 13: R 1206_M; OriginFootprint 14: R 1210_M; OriginFootprint 15: R 1812_M; OriginFootprint 16: R 2010_M; OriginFootprint 17: R 2512_M; UniqueId: 2aff7b51dc10ad2a; AddInBom: yes; OriginModelName: R 0603; BOM名称: 贴片电阻; 联系售后: https://shop463601444.taobao.com; DesignItemID: R; LibraryName: 0.1 - 电阻-电容-电感; SymbolName: R; FootprintName: R 0603_L
footprint R 0603_L
pins: 1, 2

## R_8
designator R?, comment 510R
贴片电阻; Device: R; 版权归属: 来自淘宝 ID：黄晶宝石; 封装库来自淘宝卖家 ID：黄晶宝石: 其他店铺购入均为盗版，不享受售后技术支持服务，请立即申请退款; Origin Footprint: R 0201_L; OriginFootprint 2: R 0402_L; OriginFootprint 3: R 0805_L; OriginFootprint 4: R 1206_L; OriginFootprint 5: R 1210_L; OriginFootprint 6: R 1812_L; OriginFootprint 7: R 2010_L; OriginFootprint 8: R 2512_L; OriginFootprint 9: R 0201_M; OriginFootprint 10: R 0402_M; OriginFootprint 11: R 0603_M; OriginFootprint 12: R 0805_M; OriginFootprint 13: R 1206_M; OriginFootprint 14: R 1210_M; OriginFootprint 15: R 1812_M; OriginFootprint 16: R 2010_M; OriginFootprint 17: R 2512_M; UniqueId: 353b166cc2dee846; AddInBom: yes; OriginModelName: R 0603; BOM名称: 贴片电阻; 联系售后: https://shop463601444.taobao.com; DesignItemID: R; LibraryName: 0.1 - 电阻-电容-电感; SymbolName: R; FootprintName: R 0603_L
footprint R 0603_L
pins: 1, 2

## R_9
designator R?, comment 5K
贴片电阻; Device: R; 版权归属: 来自淘宝 ID：黄晶宝石; 封装库来自淘宝卖家 ID：黄晶宝石: 其他店铺购入均为盗版，不享受售后技术支持服务，请立即申请退款; Origin Footprint: R 0201_L; OriginFootprint 2: R 0402_L; OriginFootprint 3: R 0805_L; OriginFootprint 4: R 1206_L; OriginFootprint 5: R 1210_L; OriginFootprint 6: R 1812_L; OriginFootprint 7: R 2010_L; OriginFootprint 8: R 2512_L; OriginFootprint 9: R 0201_M; OriginFootprint 10: R 0402_M; OriginFootprint 11: R 0603_M; OriginFootprint 12: R 0805_M; OriginFootprint 13: R 1206_M; OriginFootprint 14: R 1210_M; OriginFootprint 15: R 1812_M; OriginFootprint 16: R 2010_M; OriginFootprint 17: R 2512_M; UniqueId: 6a81be30a454b297; AddInBom: yes; OriginModelName: R 0603; BOM名称: 贴片电阻; 联系售后: https://shop463601444.taobao.com; DesignItemID: R; LibraryName: 0.1 - 电阻-电容-电感; SymbolName: R; FootprintName: R 0603_L
footprint R 0603_L
pins: 1, 2

## R_10
designator R?, comment 510R
贴片电阻; Device: R; 版权归属: 来自淘宝 ID：黄晶宝石; 封装库来自淘宝卖家 ID：黄晶宝石: 其他店铺购入均为盗版，不享受售后技术支持服务，请立即申请退款; Origin Footprint: R 0201_L; OriginFootprint 2: R 0402_L; OriginFootprint 3: R 0805_L; OriginFootprint 4: R 1206_L; OriginFootprint 5: R 1210_L; OriginFootprint 6: R 1812_L; OriginFootprint 7: R 2010_L; OriginFootprint 8: R 2512_L; OriginFootprint 9: R 0201_M; OriginFootprint 10: R 0402_M; OriginFootprint 11: R 0603_M; OriginFootprint 12: R 0805_M; OriginFootprint 13: R 1206_M; OriginFootprint 14: R 1210_M; OriginFootprint 15: R 1812_M; OriginFootprint 16: R 2010_M; OriginFootprint 17: R 2512_M; UniqueId: 28145adf450505d9; AddInBom: yes; OriginModelName: R 0603; BOM名称: 贴片电阻; 联系售后: https://shop463601444.taobao.com; DesignItemID: R; LibraryName: 0.1 - 电阻-电容-电感; SymbolName: R; FootprintName: R 0603_L
footprint R 0603_L
pins: 1, 2

## R_11
designator R?, comment 15K
贴片电阻; Device: R; 版权归属: 来自淘宝 ID：黄晶宝石; 封装库来自淘宝卖家 ID：黄晶宝石: 其他店铺购入均为盗版，不享受售后技术支持服务，请立即申请退款; Origin Footprint: R 0201_L; OriginFootprint 2: R 0402_L; OriginFootprint 3: R 0805_L; OriginFootprint 4: R 1206_L; OriginFootprint 5: R 1210_L; OriginFootprint 6: R 1812_L; OriginFootprint 7: R 2010_L; OriginFootprint 8: R 2512_L; OriginFootprint 9: R 0201_M; OriginFootprint 10: R 0402_M; OriginFootprint 11: R 0603_M; OriginFootprint 12: R 0805_M; OriginFootprint 13: R 1206_M; OriginFootprint 14: R 1210_M; OriginFootprint 15: R 1812_M; OriginFootprint 16: R 2010_M; OriginFootprint 17: R 2512_M; UniqueId: bc27cb7a11a997be; AddInBom: yes; OriginModelName: R 0603; BOM名称: 贴片电阻; 联系售后: https://shop463601444.taobao.com; DesignItemID: R; LibraryName: 0.1 - 电阻-电容-电感; SymbolName: R; FootprintName: R 0603_L
footprint R 0603_L
pins: 1, 2

## R_12
designator R?, comment 510R
贴片电阻; Device: R; 版权归属: 来自淘宝 ID：黄晶宝石; 封装库来自淘宝卖家 ID：黄晶宝石: 其他店铺购入均为盗版，不享受售后技术支持服务，请立即申请退款; Origin Footprint: R 0201_L; OriginFootprint 2: R 0402_L; OriginFootprint 3: R 0805_L; OriginFootprint 4: R 1206_L; OriginFootprint 5: R 1210_L; OriginFootprint 6: R 1812_L; OriginFootprint 7: R 2010_L; OriginFootprint 8: R 2512_L; OriginFootprint 9: R 0201_M; OriginFootprint 10: R 0402_M; OriginFootprint 11: R 0603_M; OriginFootprint 12: R 0805_M; OriginFootprint 13: R 1206_M; OriginFootprint 14: R 1210_M; OriginFootprint 15: R 1812_M; OriginFootprint 16: R 2010_M; OriginFootprint 17: R 2512_M; UniqueId: 09b823a69019dbbf; AddInBom: yes; OriginModelName: R 0603; BOM名称: 贴片电阻; 联系售后: https://shop463601444.taobao.com; DesignItemID: R; LibraryName: 0.1 - 电阻-电容-电感; SymbolName: R; FootprintName: R 0603_L
footprint R 0603_L
pins: 1, 2

## R_13
designator R?, comment 50K
贴片电阻; Device: R; 版权归属: 来自淘宝 ID：黄晶宝石; 封装库来自淘宝卖家 ID：黄晶宝石: 其他店铺购入均为盗版，不享受售后技术支持服务，请立即申请退款; Origin Footprint: R 0201_L; OriginFootprint 2: R 0402_L; OriginFootprint 3: R 0805_L; OriginFootprint 4: R 1206_L; OriginFootprint 5: R 1210_L; OriginFootprint 6: R 1812_L; OriginFootprint 7: R 2010_L; OriginFootprint 8: R 2512_L; OriginFootprint 9: R 0201_M; OriginFootprint 10: R 0402_M; OriginFootprint 11: R 0603_M; OriginFootprint 12: R 0805_M; OriginFootprint 13: R 1206_M; OriginFootprint 14: R 1210_M; OriginFootprint 15: R 1812_M; OriginFootprint 16: R 2010_M; OriginFootprint 17: R 2512_M; UniqueId: 21d05c86dd1c170d; AddInBom: yes; OriginModelName: R 0603; BOM名称: 贴片电阻; 联系售后: https://shop463601444.taobao.com; DesignItemID: R; LibraryName: 0.1 - 电阻-电容-电感; SymbolName: R; FootprintName: R 0603_L
footprint R 0603_L
pins: 1, 2

## R_14
designator R?, comment 510R
贴片电阻; Device: R; 版权归属: 来自淘宝 ID：黄晶宝石; 封装库来自淘宝卖家 ID：黄晶宝石: 其他店铺购入均为盗版，不享受售后技术支持服务，请立即申请退款; Origin Footprint: R 0201_L; OriginFootprint 2: R 0402_L; OriginFootprint 3: R 0805_L; OriginFootprint 4: R 1206_L; OriginFootprint 5: R 1210_L; OriginFootprint 6: R 1812_L; OriginFootprint 7: R 2010_L; OriginFootprint 8: R 2512_L; OriginFootprint 9: R 0201_M; OriginFootprint 10: R 0402_M; OriginFootprint 11: R 0603_M; OriginFootprint 12: R 0805_M; OriginFootprint 13: R 1206_M; OriginFootprint 14: R 1210_M; OriginFootprint 15: R 1812_M; OriginFootprint 16: R 2010_M; OriginFootprint 17: R 2512_M; UniqueId: 6f4c4beafd605d3e; AddInBom: yes; OriginModelName: R 0603; BOM名称: 贴片电阻; 联系售后: https://shop463601444.taobao.com; DesignItemID: R; LibraryName: 0.1 - 电阻-电容-电感; SymbolName: R; FootprintName: R 0603_L
footprint R 0603_L
pins: 1, 2

## R_15
designator R?, comment 0R
贴片电阻; Device: R; 版权归属: 来自淘宝 ID：黄晶宝石; 封装库来自淘宝卖家 ID：黄晶宝石: 其他店铺购入均为盗版，不享受售后技术支持服务，请立即申请退款; Origin Footprint: R 0201_L; OriginFootprint 2: R 0402_L; OriginFootprint 3: R 0805_L; OriginFootprint 4: R 1206_L; OriginFootprint 5: R 1210_L; OriginFootprint 6: R 1812_L; OriginFootprint 7: R 2010_L; OriginFootprint 8: R 2512_L; OriginFootprint 9: R 0201_M; OriginFootprint 10: R 0402_M; OriginFootprint 11: R 0603_M; OriginFootprint 12: R 0805_M; OriginFootprint 13: R 1206_M; OriginFootprint 14: R 1210_M; OriginFootprint 15: R 1812_M; OriginFootprint 16: R 2010_M; OriginFootprint 17: R 2512_M; UniqueId: 8075c5db455eac63; AddInBom: yes; OriginModelName: R 0603; BOM名称: 贴片电阻; 联系售后: https://shop463601444.taobao.com; DesignItemID: R; LibraryName: 0.1 - 电阻-电容-电感; SymbolName: R; FootprintName: R 0603_L
footprint R 0603_L
pins: 1, 2

## R_16
designator R?, comment 200R
贴片电阻; Device: R; 版权归属: 来自淘宝 ID：黄晶宝石; 封装库来自淘宝卖家 ID：黄晶宝石: 其他店铺购入均为盗版，不享受售后技术支持服务，请立即申请退款; Origin Footprint: R 0201_L; OriginFootprint 2: R 0402_L; OriginFootprint 3: R 0805_L; OriginFootprint 4: R 1206_L; OriginFootprint 5: R 1210_L; OriginFootprint 6: R 1812_L; OriginFootprint 7: R 2010_L; OriginFootprint 8: R 2512_L; OriginFootprint 9: R 0201_M; OriginFootprint 10: R 0402_M; OriginFootprint 11: R 0603_M; OriginFootprint 12: R 0805_M; OriginFootprint 13: R 1206_M; OriginFootprint 14: R 1210_M; OriginFootprint 15: R 1812_M; OriginFootprint 16: R 2010_M; OriginFootprint 17: R 2512_M; UniqueId: be563109538dc8ae; AddInBom: yes; OriginModelName: R 0603; BOM名称: 贴片电阻; 联系售后: https://shop463601444.taobao.com; DesignItemID: R; LibraryName: 0.1 - 电阻-电容-电感; SymbolName: R; FootprintName: R 0603_L
footprint R 0603_L
pins: 1, 2

## R_17
designator R?, comment 5K
贴片电阻; Device: R; 版权归属: 来自淘宝 ID：黄晶宝石; 封装库来自淘宝卖家 ID：黄晶宝石: 其他店铺购入均为盗版，不享受售后技术支持服务，请立即申请退款; Origin Footprint: R 0201_L; OriginFootprint 2: R 0402_L; OriginFootprint 3: R 0805_L; OriginFootprint 4: R 1206_L; OriginFootprint 5: R 1210_L; OriginFootprint 6: R 1812_L; OriginFootprint 7: R 2010_L; OriginFootprint 8: R 2512_L; OriginFootprint 9: R 0201_M; OriginFootprint 10: R 0402_M; OriginFootprint 11: R 0603_M; OriginFootprint 12: R 0805_M; OriginFootprint 13: R 1206_M; OriginFootprint 14: R 1210_M; OriginFootprint 15: R 1812_M; OriginFootprint 16: R 2010_M; OriginFootprint 17: R 2512_M; UniqueId: 6fe00e65b7cd20a6; AddInBom: yes; OriginModelName: R 0603; BOM名称: 贴片电阻; 联系售后: https://shop463601444.taobao.com; DesignItemID: R; LibraryName: 0.1 - 电阻-电容-电感; SymbolName: R; FootprintName: R 0603_L
footprint R 0603_L
pins: 1, 2

## R_18
designator R?, comment 200R
贴片电阻; Device: R; 版权归属: 来自淘宝 ID：黄晶宝石; 封装库来自淘宝卖家 ID：黄晶宝石: 其他店铺购入均为盗版，不享受售后技术支持服务，请立即申请退款; Origin Footprint: R 0201_L; OriginFootprint 2: R 0402_L; OriginFootprint 3: R 0805_L; OriginFootprint 4: R 1206_L; OriginFootprint 5: R 1210_L; OriginFootprint 6: R 1812_L; OriginFootprint 7: R 2010_L; OriginFootprint 8: R 2512_L; OriginFootprint 9: R 0201_M; OriginFootprint 10: R 0402_M; OriginFootprint 11: R 0603_M; OriginFootprint 12: R 0805_M; OriginFootprint 13: R 1206_M; OriginFootprint 14: R 1210_M; OriginFootprint 15: R 1812_M; OriginFootprint 16: R 2010_M; OriginFootprint 17: R 2512_M; UniqueId: 3011db0f8b83c791; AddInBom: yes; OriginModelName: R 0603; BOM名称: 贴片电阻; 联系售后: https://shop463601444.taobao.com; DesignItemID: R; LibraryName: 0.1 - 电阻-电容-电感; SymbolName: R; FootprintName: R 0603_L
footprint R 0603_L
pins: 1, 2

## R_19
designator R?, comment 510R
贴片电阻; Device: R; 版权归属: 来自淘宝 ID：黄晶宝石; 封装库来自淘宝卖家 ID：黄晶宝石: 其他店铺购入均为盗版，不享受售后技术支持服务，请立即申请退款; Origin Footprint: R 0201_L; OriginFootprint 2: R 0402_L; OriginFootprint 3: R 0805_L; OriginFootprint 4: R 1206_L; OriginFootprint 5: R 1210_L; OriginFootprint 6: R 1812_L; OriginFootprint 7: R 2010_L; OriginFootprint 8: R 2512_L; OriginFootprint 9: R 0201_M; OriginFootprint 10: R 0402_M; OriginFootprint 11: R 0603_M; OriginFootprint 12: R 0805_M; OriginFootprint 13: R 1206_M; OriginFootprint 14: R 1210_M; OriginFootprint 15: R 1812_M; OriginFootprint 16: R 2010_M; OriginFootprint 17: R 2512_M; UniqueId: fdc86a4b576d9e98; AddInBom: yes; OriginModelName: R 0603; BOM名称: 贴片电阻; 联系售后: https://shop463601444.taobao.com; DesignItemID: R; LibraryName: 0.1 - 电阻-电容-电感; SymbolName: R; FootprintName: R 0603_L
footprint R 0603_L
pins: 1, 2

## R_20
designator R?, comment 7684
贴片电阻; Device: R; 版权归属: 来自淘宝 ID：黄晶宝石; 封装库来自淘宝卖家 ID：黄晶宝石: 其他店铺购入均为盗版，不享受售后技术支持服务，请立即申请退款; Origin Footprint: R 0201_L; OriginFootprint 2: R 0402_L; OriginFootprint 3: R 0805_L; OriginFootprint 4: R 1206_L; OriginFootprint 5: R 1210_L; OriginFootprint 6: R 1812_L; OriginFootprint 7: R 2010_L; OriginFootprint 8: R 2512_L; OriginFootprint 9: R 0201_M; OriginFootprint 10: R 0402_M; OriginFootprint 11: R 0603_M; OriginFootprint 12: R 0805_M; OriginFootprint 13: R 1206_M; OriginFootprint 14: R 1210_M; OriginFootprint 15: R 1812_M; OriginFootprint 16: R 2010_M; OriginFootprint 17: R 2512_M; UniqueId: 8b54177fc4d64d35; AddInBom: yes; OriginModelName: R 0603; BOM名称: 贴片电阻; 联系售后: https://shop463601444.taobao.com; DesignItemID: R; LibraryName: 0.1 - 电阻-电容-电感; SymbolName: R; FootprintName: R 0603_L
footprint R 0603_L
pins: 1, 2

## R_21
designator R?, comment 7684
贴片电阻; Device: R; 版权归属: 来自淘宝 ID：黄晶宝石; 封装库来自淘宝卖家 ID：黄晶宝石: 其他店铺购入均为盗版，不享受售后技术支持服务，请立即申请退款; Origin Footprint: R 0201_L; OriginFootprint 2: R 0402_L; OriginFootprint 3: R 0805_L; OriginFootprint 4: R 1206_L; OriginFootprint 5: R 1210_L; OriginFootprint 6: R 1812_L; OriginFootprint 7: R 2010_L; OriginFootprint 8: R 2512_L; OriginFootprint 9: R 0201_M; OriginFootprint 10: R 0402_M; OriginFootprint 11: R 0603_M; OriginFootprint 12: R 0805_M; OriginFootprint 13: R 1206_M; OriginFootprint 14: R 1210_M; OriginFootprint 15: R 1812_M; OriginFootprint 16: R 2010_M; OriginFootprint 17: R 2512_M; UniqueId: 86d447fa2a9c8586; AddInBom: yes; OriginModelName: R 0603; BOM名称: 贴片电阻; 联系售后: https://shop463601444.taobao.com; DesignItemID: R; LibraryName: 0.1 - 电阻-电容-电感; SymbolName: R; FootprintName: R 0603_L
footprint R 0603_L
pins: 1, 2

## R_22
designator R?, comment 30M
贴片电阻; Device: R; 版权归属: 来自淘宝 ID：黄晶宝石; 封装库来自淘宝卖家 ID：黄晶宝石: 其他店铺购入均为盗版，不享受售后技术支持服务，请立即申请退款; Origin Footprint: R 0201_L; OriginFootprint 2: R 0402_L; OriginFootprint 3: R 0805_L; OriginFootprint 4: R 1206_L; OriginFootprint 5: R 1210_L; OriginFootprint 6: R 1812_L; OriginFootprint 7: R 2010_L; OriginFootprint 8: R 2512_L; OriginFootprint 9: R 0201_M; OriginFootprint 10: R 0402_M; OriginFootprint 11: R 0603_M; OriginFootprint 12: R 0805_M; OriginFootprint 13: R 1206_M; OriginFootprint 14: R 1210_M; OriginFootprint 15: R 1812_M; OriginFootprint 16: R 2010_M; OriginFootprint 17: R 2512_M; UniqueId: f7952e9f9cd6773b; AddInBom: yes; OriginModelName: R 0603; BOM名称: 贴片电阻; 联系售后: https://shop463601444.taobao.com; DesignItemID: R; LibraryName: 0.1 - 电阻-电容-电感; SymbolName: R; FootprintName: R 0603_L
footprint R 0603_L
pins: 1, 2

## R_23
designator R?, comment 510R
贴片电阻; Device: R; 版权归属: 来自淘宝 ID：黄晶宝石; 封装库来自淘宝卖家 ID：黄晶宝石: 其他店铺购入均为盗版，不享受售后技术支持服务，请立即申请退款; Origin Footprint: R 0201_L; OriginFootprint 2: R 0402_L; OriginFootprint 3: R 0805_L; OriginFootprint 4: R 1206_L; OriginFootprint 5: R 1210_L; OriginFootprint 6: R 1812_L; OriginFootprint 7: R 2010_L; OriginFootprint 8: R 2512_L; OriginFootprint 9: R 0201_M; OriginFootprint 10: R 0402_M; OriginFootprint 11: R 0603_M; OriginFootprint 12: R 0805_M; OriginFootprint 13: R 1206_M; OriginFootprint 14: R 1210_M; OriginFootprint 15: R 1812_M; OriginFootprint 16: R 2010_M; OriginFootprint 17: R 2512_M; UniqueId: c7fcac2dc179deab; AddInBom: yes; OriginModelName: R 0603; BOM名称: 贴片电阻; 联系售后: https://shop463601444.taobao.com; DesignItemID: R; LibraryName: 0.1 - 电阻-电容-电感; SymbolName: R; FootprintName: R 0603_L
footprint R 0603_L
pins: 1, 2

## R_24
designator R?, comment 30M
贴片电阻; Device: R; 版权归属: 来自淘宝 ID：黄晶宝石; 封装库来自淘宝卖家 ID：黄晶宝石: 其他店铺购入均为盗版，不享受售后技术支持服务，请立即申请退款; Origin Footprint: R 0201_L; OriginFootprint 2: R 0402_L; OriginFootprint 3: R 0805_L; OriginFootprint 4: R 1206_L; OriginFootprint 5: R 1210_L; OriginFootprint 6: R 1812_L; OriginFootprint 7: R 2010_L; OriginFootprint 8: R 2512_L; OriginFootprint 9: R 0201_M; OriginFootprint 10: R 0402_M; OriginFootprint 11: R 0603_M; OriginFootprint 12: R 0805_M; OriginFootprint 13: R 1206_M; OriginFootprint 14: R 1210_M; OriginFootprint 15: R 1812_M; OriginFootprint 16: R 2010_M; OriginFootprint 17: R 2512_M; UniqueId: a074999702fa02e6; AddInBom: yes; OriginModelName: R 0603; BOM名称: 贴片电阻; 联系售后: https://shop463601444.taobao.com; DesignItemID: R; LibraryName: 0.1 - 电阻-电容-电感; SymbolName: R; FootprintName: R 0603_L
footprint R 0603_L
pins: 1, 2

## R_25
designator R?, comment 不焊
贴片电阻; Device: R; 版权归属: 来自淘宝 ID：黄晶宝石; 封装库来自淘宝卖家 ID：黄晶宝石: 其他店铺购入均为盗版，不享受售后技术支持服务，请立即申请退款; Origin Footprint: R 0201_L; OriginFootprint 2: R 0402_L; OriginFootprint 3: R 0805_L; OriginFootprint 4: R 1206_L; OriginFootprint 5: R 1210_L; OriginFootprint 6: R 1812_L; OriginFootprint 7: R 2010_L; OriginFootprint 8: R 2512_L; OriginFootprint 9: R 0201_M; OriginFootprint 10: R 0402_M; OriginFootprint 11: R 0603_M; OriginFootprint 12: R 0805_M; OriginFootprint 13: R 1206_M; OriginFootprint 14: R 1210_M; OriginFootprint 15: R 1812_M; OriginFootprint 16: R 2010_M; OriginFootprint 17: R 2512_M; UniqueId: e0ee0f05e2f0b4da; AddInBom: yes; OriginModelName: R 0603; BOM名称: 贴片电阻; 联系售后: https://shop463601444.taobao.com; DesignItemID: R; LibraryName: 0.1 - 电阻-电容-电感; SymbolName: R; FootprintName: R 0603_L
footprint R 0603_L
pins: 1, 2

## R_26
designator R?, comment 510R
贴片电阻; Device: R; 版权归属: 来自淘宝 ID：黄晶宝石; 封装库来自淘宝卖家 ID：黄晶宝石: 其他店铺购入均为盗版，不享受售后技术支持服务，请立即申请退款; Origin Footprint: R 0201_L; OriginFootprint 2: R 0402_L; OriginFootprint 3: R 0805_L; OriginFootprint 4: R 1206_L; OriginFootprint 5: R 1210_L; OriginFootprint 6: R 1812_L; OriginFootprint 7: R 2010_L; OriginFootprint 8: R 2512_L; OriginFootprint 9: R 0201_M; OriginFootprint 10: R 0402_M; OriginFootprint 11: R 0603_M; OriginFootprint 12: R 0805_M; OriginFootprint 13: R 1206_M; OriginFootprint 14: R 1210_M; OriginFootprint 15: R 1812_M; OriginFootprint 16: R 2010_M; OriginFootprint 17: R 2512_M; UniqueId: 3fbbebc0b09736fe; AddInBom: yes; OriginModelName: R 0603; BOM名称: 贴片电阻; 联系售后: https://shop463601444.taobao.com; DesignItemID: R; LibraryName: 0.1 - 电阻-电容-电感; SymbolName: R; FootprintName: R 0603_L
footprint R 0603_L
pins: 1, 2

## R_27
designator R?, comment 510R
贴片电阻; Device: R; 版权归属: 来自淘宝 ID：黄晶宝石; 封装库来自淘宝卖家 ID：黄晶宝石: 其他店铺购入均为盗版，不享受售后技术支持服务，请立即申请退款; Origin Footprint: R 0201_L; OriginFootprint 2: R 0402_L; OriginFootprint 3: R 0805_L; OriginFootprint 4: R 1206_L; OriginFootprint 5: R 1210_L; OriginFootprint 6: R 1812_L; OriginFootprint 7: R 2010_L; OriginFootprint 8: R 2512_L; OriginFootprint 9: R 0201_M; OriginFootprint 10: R 0402_M; OriginFootprint 11: R 0603_M; OriginFootprint 12: R 0805_M; OriginFootprint 13: R 1206_M; OriginFootprint 14: R 1210_M; OriginFootprint 15: R 1812_M; OriginFootprint 16: R 2010_M; OriginFootprint 17: R 2512_M; UniqueId: 6f63fc6711cfa315; AddInBom: yes; OriginModelName: R 0603; BOM名称: 贴片电阻; 联系售后: https://shop463601444.taobao.com; DesignItemID: R; LibraryName: 0.1 - 电阻-电容-电感; SymbolName: R; FootprintName: R 0603_L
footprint R 0603_L
pins: 1, 2